# Altium footprint library zmct103c.PcbLib: 1 footprints
Each footprint in its own frame and in the unit in brackets; x right, y up, seen from the top. Pads: shape width x height; smd on the part's side, far side on the other; paste and mask are expansions set on the pad; w line width, h text height; cw(c..) or ccw(c..) is an arc to the next point about the centre after c.
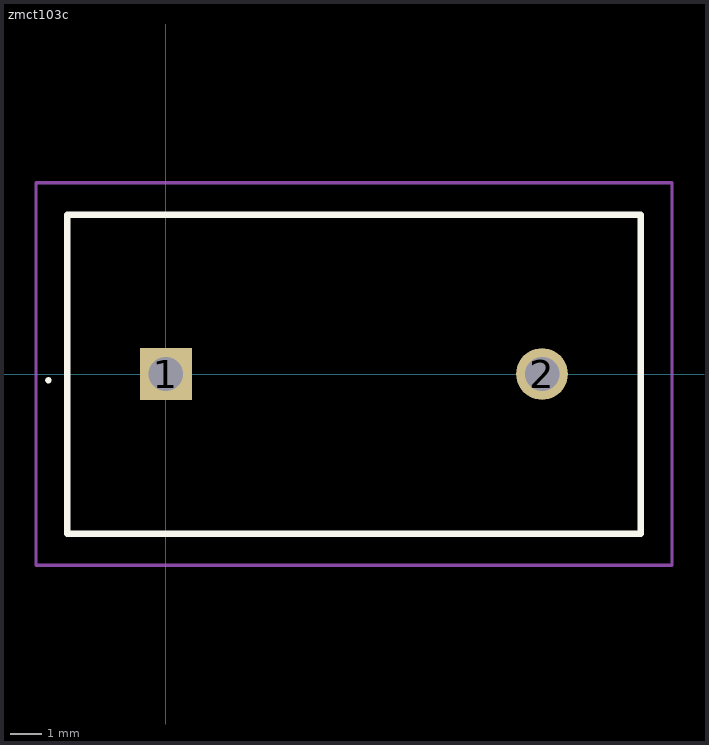
[diagram p0: the footprint, top view; thin cyan lines are the x and y axes]

## zmct103c [mm]
pads (2):
  rect 1.65x1.65 hole 1.1: 1(0,0)
  round 1.65 hole 1.1: 2(12,0)
Top Overlay:
  lines w0.1: -3.8,-0.2 -3.8,-0.2 ; -3.8,-0.2 ccw(c-3.75,-0.2) -3.7,-0.2 ; -3.8,-0.2 cw(c-3.75,-0.2) -3.7,-0.2 ; -3.7,-0.2 -3.7,-0.2
  lines w0.2: -3.15,-5.1 15.15,-5.1 15.15,5.08 -3.15,5.08 -3.15,-5.1
Mechanical 15:
  lines w0.1: -3.15,-5.1 15.15,-5.1 15.15,5.1 -3.15,5.1 -3.15,-5.1
Mechanical 20:
  lines w0.1: -4.15,-6.1 16.15,-6.1 16.15,6.1 -4.15,6.1 -4.15,-6.1